# EAGLE library part Conn_2x05_1.27mm_Shrouded (library JR)
2 x 5 header, 1.27 mm pitch, shrouded, through-hole
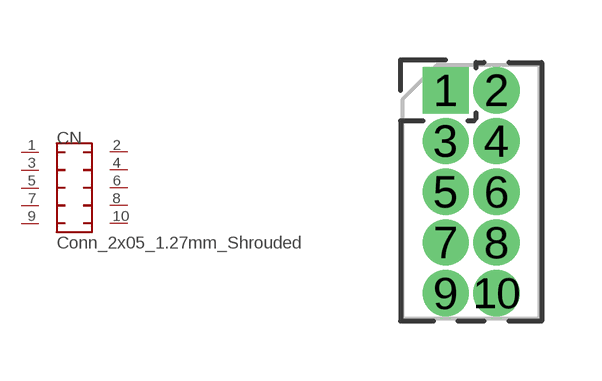
[diagram p3: symbol with the pads of PinHeader_2x05_P1.27mm_Vertical; footprint PinHeader_2x05_P1.27mm_Vertical]

Designator prefix CN

## Conn_2x05_1.27mm_Shrouded (DESCRIPTION: 2 x 5 header, 1.27 mm pitch, shrouded, through-hole; MPN: 1.27 mm 2x5 box header THT)  [PinHeader_2x05_P1.27mm_Vertical]
1  1  pas
2  2  pas
3  3  pas
4  4  pas
5  5  pas
6  6  pas
7  7  pas
8  8  pas
9  9  pas
10  10  pas

## Footprint PinHeader_2x05_P1.27mm_Vertical (pad centres in mm)
Through hole straight pin header, 2x05, 1.27mm pitch, double rows
drill 0.65 pad 1 square: 1 0,0
drill 0.65 pad 1 round: 2 1.27,0; 3 0,-1.27; 4 1.27,-1.27; 5 0,-2.54; 6 1.27,-2.54; 7 0,-3.81; 8 1.27,-3.81; 9 0,-5.08; 10 1.27,-5.08